# Altium integrated library C1005X7R1H102K050BA.IntLib: 1 symbol
Pins are listed as number, name and electrical type; pins without a type are passive.

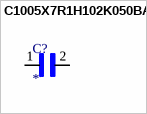
[diagram p0: symbol C1005X7R1H102K050BA]

## C1005X7R1H102K050BA
designator C?
1000 pF Â±10% 50V Ceramic Capacitor X7R 0402 (1005 Metric); MP: C1005X7R1H102K050BA; MF: TDK; Purchase-URL: https://pricing.snapeda.com/search/part/C1005X7R1H102K050BA/?ref=eda; Package: 1005 TDK; Digi-Key_Part_Number: 445-1256-2-ND; Value: *; Check_prices: https://www.snapeda.com/parts/C1005X7R1H102K050BA/TDK/view-part/?ref=eda; SnapEDA_Link: https://www.snapeda.com/parts/C1005X7R1H102K050BA/TDK/view-part/?ref=snap
footprint CAPC1005X55N
pins: 1, 2